# Altium footprint library MY_LIB_LED.PcbLib: 9 footprints
Each footprint in its own frame and in the unit in brackets; x right, y up, seen from the top. Pads: shape width x height; smd on the part's side, far side on the other; paste and mask are expansions set on the pad; w line width, h text height; cw(c..) or ccw(c..) is an arc to the next point about the centre after c.
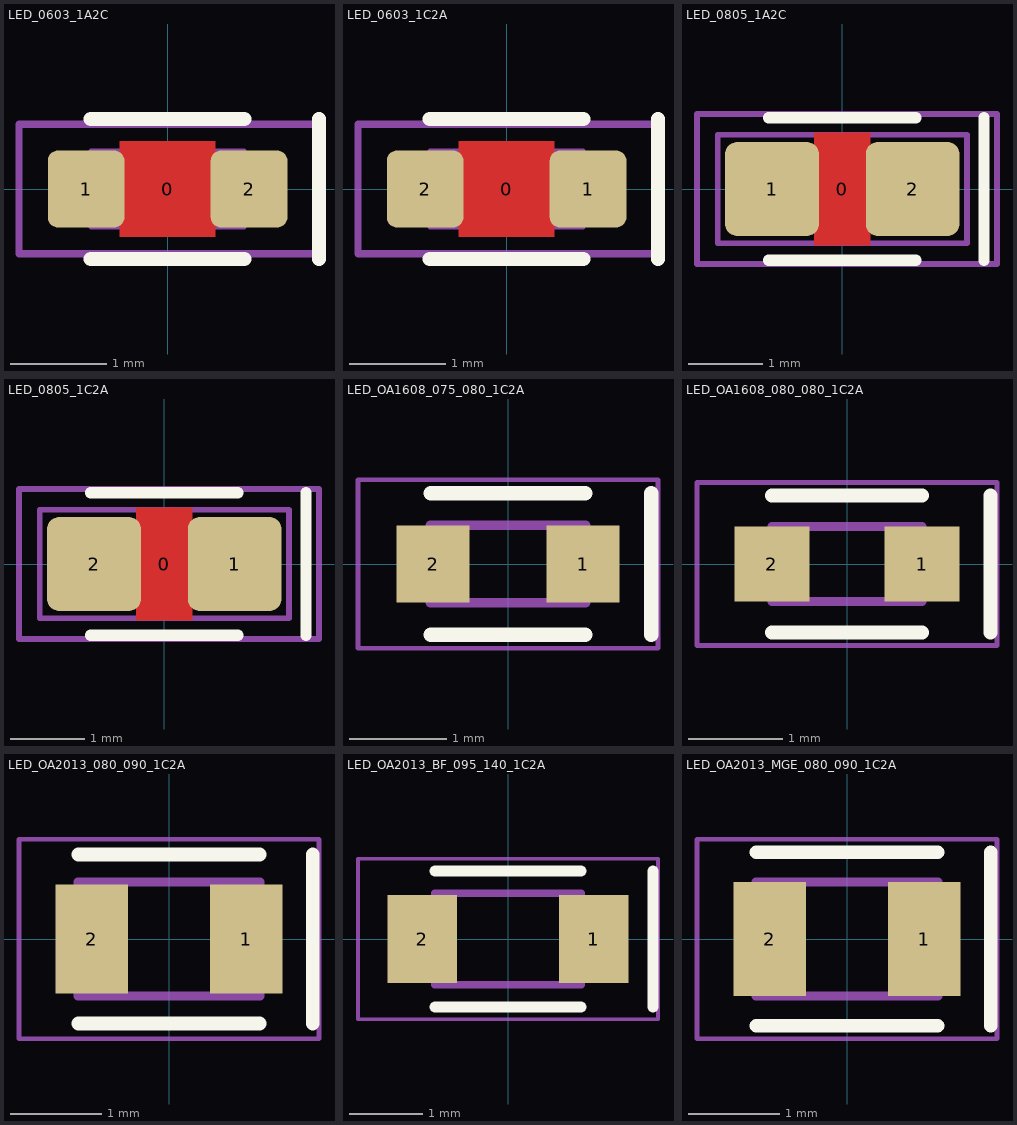
[diagram p0: the footprints below, top view; thin cyan lines are the x and y axes]

## LED_0603_1A2C [mm]
height 0.8
pads (3):
  round 0.254 on Mech15: 0(0,0)
  rrect25% 0.8x0.8 smd: 1(-0.85,0) 2(0.85,0)
Top Layer:
  pour cut-out: -0.5,0.5 0.5,0.5 0.5,-0.5 -0.5,-0.5
Top Overlay:
  lines w0.15: -0.8,-0.73 0.8,-0.73 ; -0.8,0.73 0.8,0.73 ; 1.58,-0.73 1.58,0.73
13 - 3D Top Side:
  lines w0.05: -0.6,-0.4 -0.6,0.399 0.6,0.4 0.6,-0.4 -0.6,-0.399 ; -0.505,-0.398 -0.505,0.398 ; -0.5,-0.4 -0.8,-0.4 -0.8,0.4 -0.5,0.4 ; 0.5,-0.4 0.8,-0.4 0.8,0.4 0.5,0.4 ; 0.505,-0.398 0.505,0.398 ; -0.599,-0.398 0.599,-0.398 0.599,0.398 -0.599,0.398 -0.599,-0.398
15 - Top Courtyards:
  lines w0.076: -1.55,-0.675 1.55,-0.675 1.55,0.675 -1.55,0.675 -1.55,-0.675
3D body: height 0.75, standoff 0, extent -0.8,-0.4 0.8,0.4

## LED_0603_1C2A [mm]
height 0.8
pads (3):
  round 0.254 on Mech15: 0(0,0)
  rrect25% 0.8x0.8 smd: 1(0.85,0) 2(-0.85,0)
Top Layer:
  pour cut-out: -0.5,0.5 0.5,0.5 0.5,-0.5 -0.5,-0.5
Top Overlay:
  lines w0.15: -0.8,-0.73 0.8,-0.73 ; -0.8,0.73 0.8,0.73 ; 1.58,-0.73 1.58,0.73
13 - 3D Top Side:
  lines w0.05: -0.6,-0.4 -0.6,0.399 0.6,0.4 0.6,-0.4 -0.6,-0.399 ; -0.505,-0.398 -0.505,0.398 ; -0.5,-0.4 -0.8,-0.4 -0.8,0.4 -0.5,0.4 ; 0.5,-0.4 0.8,-0.4 0.8,0.4 0.5,0.4 ; 0.505,-0.398 0.505,0.398 ; -0.599,-0.398 0.599,-0.398 0.599,0.398 -0.599,0.398 -0.599,-0.398
15 - Top Courtyards:
  lines w0.076: -1.55,-0.675 1.55,-0.675 1.55,0.675 -1.55,0.675 -1.55,-0.675
3D body: height 0.75, standoff 0, extent -0.8,-0.4 0.8,0.4

## LED_0805_1A2C [mil]
height 31.5
pads (3):
  round 20 on Mech15: 0(0,0)
  rrect25% 50x50 smd: 1(-37.5,0) 2(37.5,0)
Top Layer:
  pour cut-out: -15,30 15,30 15,-30 -15,-30
Top Overlay:
  lines w5.91: -39.37,-37.99 39.37,-37.99 ; -39.37,37.99 39.37,37.99 ; 75.49,-37.99 75.49,37.99
13 - 3D Top Side:
  lines w3: -66.5,-29 66.5,-29 66.5,29 -66.5,29 -66.5,-29
15 - Top Courtyards:
  lines w3: -77.5,-40 82.5,-40 82.5,40 -77.5,40 -77.5,-40
3D body: height 31.5, standoff 11.81, extent -28.65,-24.6 26.49,24.61
3D body: height 11.81, standoff 3.94, extent -39.37,-24.61 39.37,24.61
3D body: height 3.94, standoff 0, extent -39.37,-24.61 39.37,24.61
3D body: height 3.94, standoff 0, extent -11.81,-15.75 11.81,15.75

## LED_0805_1C2A [mil]
height 31.5
pads (3):
  round 20 on Mech15: 0(0,0)
  rrect25% 50x50 smd: 1(37.5,0) 2(-37.5,0)
Top Layer:
  pour cut-out: -15,30 15,30 15,-30 -15,-30
Top Overlay:
  lines w5.91: -39.37,-37.99 39.37,-37.99 ; -39.37,37.99 39.37,37.99 ; 75.49,-37.99 75.49,37.99
13 - 3D Top Side:
  lines w3: -66.5,-29 66.5,-29 66.5,29 -66.5,29 -66.5,-29
15 - Top Courtyards:
  lines w3: -77.5,-40 82.5,-40 82.5,40 -77.5,40 -77.5,-40
3D body: height 31.5, standoff 11.81, extent -28.65,-24.6 26.49,24.61
3D body: height 11.81, standoff 3.94, extent -39.37,-24.61 39.37,24.61
3D body: height 3.94, standoff 0, extent -39.37,-24.61 39.37,24.61
3D body: height 3.94, standoff 0, extent -11.81,-15.75 11.81,15.75

## LED_OA1608_075_080_1C2A [mm] "manufacturer recommended; PG/MRE 2017; pad 0.75x0.8 gap 0.8mm; 1=K right 2=A left; generic standard 3D, not exact Oasistek"
height 0.8
pads (2):
  rect 0.75x0.8 smd paste+0 mask+0.05: 1(0.775,0) 2(-0.775,0)
Top Overlay:
  lines w0.15: -0.8,-0.73 0.8,-0.73 ; -0.8,0.73 0.8,0.73 ; 1.48,-0.73 1.48,0.73
13 - 3D Top Side:
  lines w0.1: 0.65,-0.4 0.65,0.4 ; -0.8,-0.4 0.8,-0.4 0.8,0.4 -0.8,0.4 -0.8,-0.4
15 - Top Courtyards:
  lines w0.05: -1.55,-0.87 1.55,-0.87 1.55,0.87 -1.55,0.87 -1.55,-0.87
3D body: height 0.75, standoff 0, extent -0.8,-0.4 0.8,0.4

## LED_OA1608_080_080_1C2A [mm] "manufacturer recommended; BF/MGE/MYF 2015; pad 0.8x0.8 gap 0.8mm; 1=K right 2=A left; generic standard 3D, not exact Oasistek"
height 0.8
pads (2):
  rect 0.8x0.8 smd paste+0 mask+0.05: 1(0.8,0) 2(-0.8,0)
Top Overlay:
  lines w0.15: -0.8,-0.73 0.8,-0.73 ; -0.8,0.73 0.8,0.73 ; 1.53,-0.73 1.53,0.73
13 - 3D Top Side:
  lines w0.1: 0.65,-0.4 0.65,0.4 ; -0.8,-0.4 0.8,-0.4 0.8,0.4 -0.8,0.4 -0.8,-0.4
15 - Top Courtyards:
  lines w0.05: -1.6,-0.87 1.6,-0.87 1.6,0.87 -1.6,0.87 -1.6,-0.87
3D body: height 0.75, standoff 0, extent -0.8,-0.4 0.8,0.4

## LED_OA2013_080_090_1C2A [mm] "manufacturer recommended; PG/MRE 2017; pad 0.8x1.2 gap 0.9mm; 1=K right 2=A left; generic standard 3D, not exact Oasistek"
height 0.8
pads (2):
  rect 0.8x1.2 smd paste+0 mask+0.05: 1(0.85,0) 2(-0.85,0)
Top Overlay:
  lines w0.15: -1,-0.93 1,-0.93 ; -1,0.93 1,0.93 ; 1.58,-0.93 1.58,0.93
13 - 3D Top Side:
  lines w0.1: 0.85,-0.625 0.85,0.625 ; -1,-0.625 1,-0.625 1,0.625 -1,0.625 -1,-0.625
15 - Top Courtyards:
  lines w0.05: -1.65,-1.095 1.65,-1.095 1.65,1.095 -1.65,1.095 -1.65,-1.095
3D body: height 0.8, standoff 0.3, extent -0.728,-0.625 0.673,0.625
3D body: height 0.3, standoff 0.1, extent -1,-0.625 1,0.625
3D body: height 0.1, standoff 0, extent -1,-0.625 1,0.625
3D body: height 0.1, standoff 0, extent -0.3,-0.4 0.3,0.4

## LED_OA2013_BF_095_140_1C2A [mm] "manufacturer recommended; BF 2015; pad 0.95x1.2 gap 1.4mm; 1=K right 2=A left; generic standard 3D, not exact Oasistek"
height 0.8
pads (2):
  rect 0.95x1.2 smd paste+0 mask+0.05: 1(1.175,0) 2(-1.175,0)
Top Overlay:
  lines w0.15: -1,-0.93 1,-0.93 ; -1,0.93 1,0.93 ; 1.98,-0.93 1.98,0.93
13 - 3D Top Side:
  lines w0.1: 0.85,-0.625 0.85,0.625 ; -1,-0.625 1,-0.625 1,0.625 -1,0.625 -1,-0.625
15 - Top Courtyards:
  lines w0.05: -2.05,-1.095 2.05,-1.095 2.05,1.095 -2.05,1.095 -2.05,-1.095
3D body: height 0.8, standoff 0.3, extent -0.728,-0.625 0.673,0.625
3D body: height 0.3, standoff 0.1, extent -1,-0.625 1,0.625
3D body: height 0.1, standoff 0, extent -1,-0.625 1,0.625
3D body: height 0.1, standoff 0, extent -0.3,-0.4 0.3,0.4

## LED_OA2013_MGE_080_090_1C2A [mm] "engineering lands; GS100130 terminals; nominal toe .25 heel .15; not manufacturer land recommendation; pad 0.8x1.25 gap 0.9mm; 1=K right 2=A left; generic standard 3D, not exact Oasistek"
height 0.8
pads (2):
  rect 0.8x1.25 smd paste+0 mask+0.05: 1(0.85,0) 2(-0.85,0)
Top Overlay:
  lines w0.15: -1,-0.955 1,-0.955 ; -1,0.955 1,0.955 ; 1.58,-0.955 1.58,0.955
13 - 3D Top Side:
  lines w0.1: 0.85,-0.625 0.85,0.625 ; -1,-0.625 1,-0.625 1,0.625 -1,0.625 -1,-0.625
15 - Top Courtyards:
  lines w0.05: -1.65,-1.095 1.65,-1.095 1.65,1.095 -1.65,1.095 -1.65,-1.095
3D body: height 0.8, standoff 0.3, extent -0.728,-0.625 0.673,0.625
3D body: height 0.3, standoff 0.1, extent -1,-0.625 1,0.625
3D body: height 0.1, standoff 0, extent -1,-0.625 1,0.625
3D body: height 0.1, standoff 0, extent -0.3,-0.4 0.3,0.4